# EAGLE library part DRV2605LYZFR (library DRV2605LYZFR)
Haptic Driver for ERM and LRA with Built-In Library and Smart Loop Architecture Source: Datasheet <http://www.ti.com/lit/gpn/drv2605l>
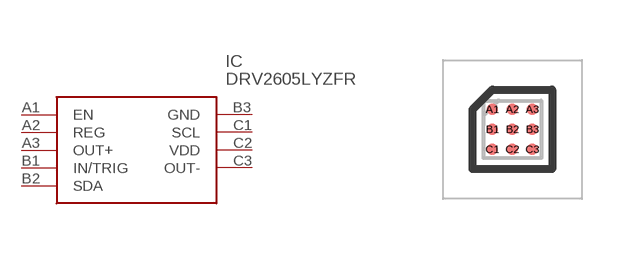
[diagram p0: symbol with the pads of BGA9C50P3X3_144X144X62; footprint BGA9C50P3X3_144X144X62]

Designator prefix IC

## DRV2605LYZFR (Description: Haptic Driver for ERM and LRA with Built-In Library and Smart Loop Architecture; Height: 0.625mm; Manufacturer_Name: Texas Instruments; Manufacturer_Part_Number: DRV2605LYZFR; Mouser_Part_Number: 595-DRV2605LYZFR; Mouser_Price-Stock: https://www.mouser.co.uk/ProductDetail/Texas-Instruments/DRV2605LYZFR?qs=7z%252BmIopC6%2FIPohzEGVWenA%3D%3D)  [BGA9C50P3X3_144X144X62]
A1  EN
A2  REG
A3  OUT+
B1  IN/TRIG
B2  SDA
B3  GND
C1  SCL
C2  VDD
C3  OUT-

## Footprint BGA9C50P3X3_144X144X62 (pad centres in mm)
YZF (S-XBGA-N9)
smd 0.29 x 0.29: A1 -0.5,0.5; A2 0,0.5; A3 0.5,0.5; B1 -0.5,0; B2 0,0; B3 0.5,0; C1 -0.5,-0.5; C2 0,-0.5; C3 0.5,-0.5